# Altium footprint library WR-MPC3.PcbLib: 235 footprints (part 15 of 15)
Each footprint in its own frame and in the unit in brackets; x right, y up, seen from the top. Pads: shape width x height; smd on the part's side, far side on the other; paste and mask are expansions set on the pad; w line width, h text height; cw(c..) or ccw(c..) is an arc to the next point about the centre after c.
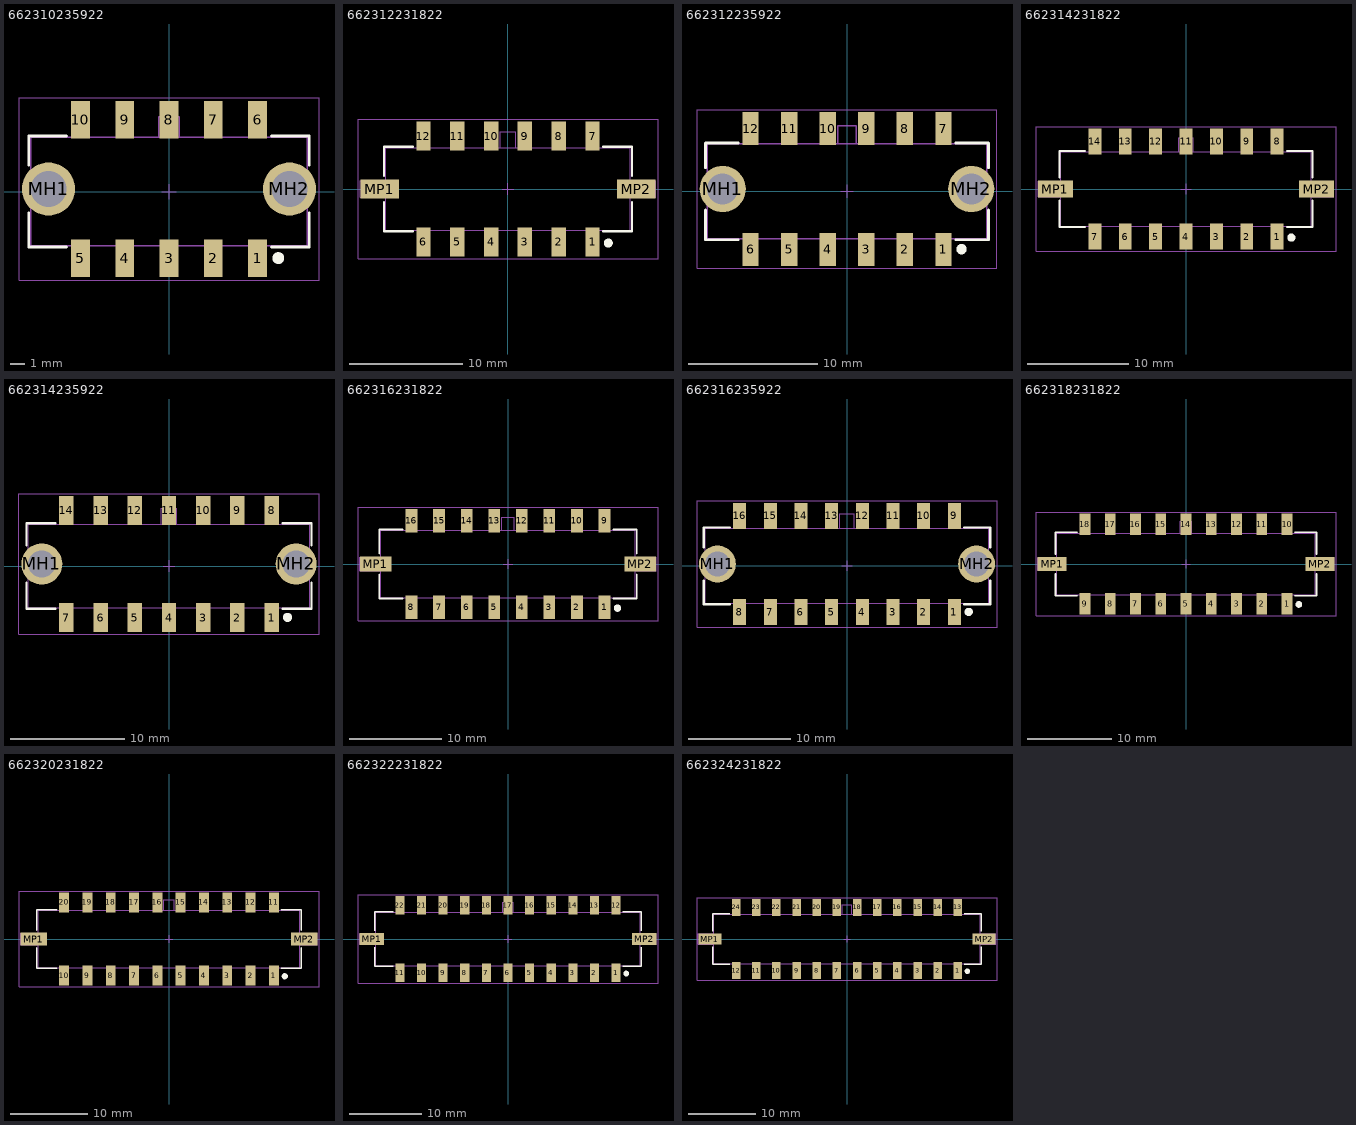
[diagram p14: the footprints below, top view; thin cyan lines are the x and y axes]

## 662310235922 [mm] "3.00mm SMT Male Dual Row Vertical Header with THT Retention Clip, 10p"
height 9.9
pads (12):
  rect 1.27x2.54 smd: 1(6,-4.52) 2(3,-4.52) 3(0,-4.52) 4(-3,-4.52) 5(-6,-4.52) 6(6,4.88) 7(3,4.88) 8(0,4.88) 9(-3,4.88) 10(-6,4.88)
  round 3.6 hole 2.41: MH1(-8.16,0.18) MH2(8.16,0.18)
Top Overlay:
  circle w0.4: c7.4,-4.5 r0.2
  lines w0.2: -9.5,-1.455 -9.5,-3.755 -6.95,-3.755 ; -9.5,1.815 -9.5,3.755 -6.95,3.755 ; 6.95,-3.755 9.5,-3.755 9.5,-1.455 ; 6.95,3.755 9.5,3.755 9.5,1.815
Top Designator:
  text ".Designator" at -7.498,-0.5 h1.5
Top Component Outline:
  lines w0.1: -6.32,-3.68 -6.32,-5.45 -5.68,-5.45 -5.68,-3.68 ; -6.32,3.68 -6.32,5.95 -5.68,5.95 -5.68,3.68 ; -3.32,-3.68 -3.32,-5.45 -2.68,-5.45 -2.68,-3.68 ; -3.32,3.68 -3.32,5.95 -2.68,5.95 -2.68,3.68 ; -0.7,3.68 -0.7,5.08 0.7,5.08 0.7,3.68 ; -0.32,-3.68 -0.32,-5.45 0.32,-5.45 0.32,-3.68 ; -0.32,3.68 -0.32,5.95 0.32,5.95 0.32,3.68 ; 2.68,-3.68 2.68,-5.45 3.32,-5.45 3.32,-3.68 ; 2.68,3.68 2.68,5.95 3.32,5.95 3.32,3.68 ; 5.68,-3.68 5.68,-5.45 6.32,-5.45 6.32,-3.68 ; 5.68,3.68 5.68,5.95 6.32,5.95 6.32,3.68 ; -9.35,-3.68 9.35,-3.68 9.35,3.68 -9.35,3.68 -9.35,-3.68
Top 3D Body:
  lines w0.1: -6.32,-3.68 -6.32,-5.45 -5.68,-5.45 -5.68,-3.68 ; -6.32,3.68 -6.32,5.95 -5.68,5.95 -5.68,3.68 ; -3.32,-3.68 -3.32,-5.45 -2.68,-5.45 -2.68,-3.68 ; -3.32,3.68 -3.32,5.95 -2.68,5.95 -2.68,3.68 ; -0.7,3.68 -0.7,5.08 0.7,5.08 0.7,3.68 ; -0.32,-3.68 -0.32,-5.45 0.32,-5.45 0.32,-3.68 ; -0.32,3.68 -0.32,5.95 0.32,5.95 0.32,3.68 ; 2.68,-3.68 2.68,-5.45 3.32,-5.45 3.32,-3.68 ; 2.68,3.68 2.68,5.95 3.32,5.95 3.32,3.68 ; 5.68,-3.68 5.68,-5.45 6.32,-5.45 6.32,-3.68 ; 5.68,3.68 5.68,5.95 6.32,5.95 6.32,3.68 ; -9.35,-3.68 -9.35,3.68 9.35,3.68 9.35,-3.68 -9.35,-3.68
Top Courtyard:
  lines w0.05: -10.16,-5.99 10.16,-5.99 10.16,6.35 -10.16,6.35 -10.16,-5.99
Top Component Center:
  lines w0.05: -0.5,0 0.5,0 ; 0,-0.5 0,0.5
3D body "662310235922.stp": height 11.42, standoff -3.08, extent -9.35,-5.45 9.35,5.95

## 662312231822 [mm] "3.00mm SMT Male Dual Row Vertical Header with SMT Solder Tab, 12p"
height 9.9
pads (14):
  rect 1.27x2.54 smd: 1(7.5,-4.7) 2(4.5,-4.7) 3(1.5,-4.7) 4(-1.5,-4.7) 5(-4.5,-4.7) 6(-7.5,-4.7) 7(7.5,4.7) 8(4.5,4.7) 9(1.5,4.7) 10(-1.5,4.7) 11(-4.5,4.7) 12(-7.5,4.7)
  rect 3.43x1.65 smd: MP1(-11.395,0) MP2(11.395,0)
Top Overlay:
  circle w0.4: c8.9,-4.795 r0.2
  lines w0.2: -11,-1.155 -11,-3.755 -8.45,-3.755 ; -11,1.155 -11,3.755 -8.45,3.755 ; 8.45,-3.755 11,-3.755 11,-1.155 ; 8.45,3.755 11,3.755 11,1.155
Top Designator:
  text ".Designator" at -7.498,-0.5 h1.5
Top Component Outline:
  lines w0.1: -10.85,-0.75 -13.1,-0.75 -13.1,0.75 -10.85,0.75 ; -7.82,-3.68 -7.82,-5.698 -7.18,-5.698 -7.18,-3.68 ; -7.82,3.68 -7.82,5.698 -7.18,5.698 -7.18,3.68 ; -4.82,-3.68 -4.82,-5.698 -4.18,-5.698 -4.18,-3.68 ; -4.82,3.68 -4.82,5.698 -4.18,5.698 -4.18,3.68 ; -1.82,-3.68 -1.82,-5.698 -1.18,-5.698 -1.18,-3.68 ; -1.82,3.68 -1.82,5.698 -1.18,5.698 -1.18,3.68 ; -0.7,3.68 -0.7,5.08 0.7,5.08 0.7,3.68 ; 1.18,-3.68 1.18,-5.698 1.82,-5.698 1.82,-3.68 ; 1.18,3.68 1.18,5.698 1.82,5.698 1.82,3.68 ; 4.18,-3.68 4.18,-5.698 4.82,-5.698 4.82,-3.68 ; 4.18,3.68 4.18,5.698 4.82,5.698 4.82,3.68 ; 7.18,-3.68 7.18,-5.698 7.82,-5.698 7.82,-3.68 ; 7.18,3.68 7.18,5.698 7.82,5.698 7.82,3.68 ; 10.85,-0.75 13.1,-0.75 13.1,0.75 10.85,0.75 ; -10.85,-3.68 10.85,-3.68 10.85,3.68 -10.85,3.68 -10.85,-3.68
Top 3D Body:
  lines w0.1: -10.85,-0.75 -13.1,-0.75 -13.1,0.75 -10.85,0.75 ; -7.82,-3.68 -7.82,-5.698 -7.18,-5.698 -7.18,-3.68 ; -7.82,3.68 -7.82,5.698 -7.18,5.698 -7.18,3.68 ; -4.82,-3.68 -4.82,-5.698 -4.18,-5.698 -4.18,-3.68 ; -4.82,3.68 -4.82,5.698 -4.18,5.698 -4.18,3.68 ; -1.82,-3.68 -1.82,-5.698 -1.18,-5.698 -1.18,-3.68 ; -1.82,3.68 -1.82,5.698 -1.18,5.698 -1.18,3.68 ; -0.7,3.68 -0.7,5.08 0.7,5.08 0.7,3.68 ; 1.18,-3.68 1.18,-5.698 1.82,-5.698 1.82,-3.68 ; 1.18,3.68 1.18,5.698 1.82,5.698 1.82,3.68 ; 4.18,-3.68 4.18,-5.698 4.82,-5.698 4.82,-3.68 ; 4.18,3.68 4.18,5.698 4.82,5.698 4.82,3.68 ; 7.18,-3.68 7.18,-5.698 7.82,-5.698 7.82,-3.68 ; 7.18,3.68 7.18,5.698 7.82,5.698 7.82,3.68 ; 10.85,-0.75 13.1,-0.75 13.1,0.75 10.85,0.75 ; -10.85,-3.68 10.85,-3.68 10.85,3.68 -10.85,3.68 -10.85,-3.68
Top Courtyard:
  lines w0.05: -13.31,-6.17 13.31,-6.17 13.31,6.17 -13.31,6.17 -13.31,-6.17
Top Component Center:
  lines w0.05: -0.5,0 0.5,0 ; 0,-0.5 0,0.5
3D body "662312231822.stp": height 11.43, standoff 0.03, extent -13.1,-5.698 13.1,5.698

## 662312235922 [mm] "3.00mm SMT Male Dual Row Vertical Header with THT Retention Clip, 12p"
height 9.9
pads (14):
  rect 1.27x2.54 smd: 1(7.5,-4.52) 2(4.5,-4.52) 3(1.5,-4.52) 4(-1.5,-4.52) 5(-4.5,-4.52) 6(-7.5,-4.52) 7(7.5,4.88) 8(4.5,4.88) 9(1.5,4.88) 10(-1.5,4.88) 11(-4.5,4.88) 12(-7.5,4.88)
  round 3.6 hole 2.41: MH1(-9.66,0.18) MH2(9.66,0.18)
Top Overlay:
  circle w0.4: c8.9,-4.5 r0.2
  lines w0.2: -11,-1.455 -11,-3.755 -8.45,-3.755 ; -11,1.815 -11,3.755 -8.45,3.755 ; 8.45,-3.755 11,-3.755 11,-1.455 ; 8.45,3.755 11,3.755 11,1.815
Top Designator:
  text ".Designator" at -7.498,-0.5 h1.5
Top Component Outline:
  lines w0.1: -7.82,-3.68 -7.82,-5.45 -7.18,-5.45 -7.18,-3.68 ; -7.82,3.68 -7.82,5.95 -7.18,5.95 -7.18,3.68 ; -4.82,-3.68 -4.82,-5.45 -4.18,-5.45 -4.18,-3.68 ; -4.82,3.68 -4.82,5.95 -4.18,5.95 -4.18,3.68 ; -1.82,-3.68 -1.82,-5.45 -1.18,-5.45 -1.18,-3.68 ; -1.82,3.68 -1.82,5.95 -1.18,5.95 -1.18,3.68 ; -0.7,3.68 -0.7,5.08 0.7,5.08 0.7,3.68 ; 1.18,-3.68 1.18,-5.45 1.82,-5.45 1.82,-3.68 ; 1.18,3.68 1.18,5.95 1.82,5.95 1.82,3.68 ; 4.18,-3.68 4.18,-5.45 4.82,-5.45 4.82,-3.68 ; 4.18,3.68 4.18,5.95 4.82,5.95 4.82,3.68 ; 7.18,-3.68 7.18,-5.45 7.82,-5.45 7.82,-3.68 ; 7.18,3.68 7.18,5.95 7.82,5.95 7.82,3.68 ; -10.85,-3.68 10.85,-3.68 10.85,3.68 -10.85,3.68 -10.85,-3.68
Top 3D Body:
  lines w0.1: -7.82,-3.68 -7.82,-5.45 -7.18,-5.45 -7.18,-3.68 ; -7.82,3.68 -7.82,5.95 -7.18,5.95 -7.18,3.68 ; -4.82,-3.68 -4.82,-5.45 -4.18,-5.45 -4.18,-3.68 ; -4.82,3.68 -4.82,5.95 -4.18,5.95 -4.18,3.68 ; -1.82,-3.68 -1.82,-5.45 -1.18,-5.45 -1.18,-3.68 ; -1.82,3.68 -1.82,5.95 -1.18,5.95 -1.18,3.68 ; -0.7,3.68 -0.7,5.08 0.7,5.08 0.7,3.68 ; 1.18,-3.68 1.18,-5.45 1.82,-5.45 1.82,-3.68 ; 1.18,3.68 1.18,5.95 1.82,5.95 1.82,3.68 ; 4.18,-3.68 4.18,-5.45 4.82,-5.45 4.82,-3.68 ; 4.18,3.68 4.18,5.95 4.82,5.95 4.82,3.68 ; 7.18,-3.68 7.18,-5.45 7.82,-5.45 7.82,-3.68 ; 7.18,3.68 7.18,5.95 7.82,5.95 7.82,3.68 ; -10.85,-3.68 10.85,-3.68 10.85,3.68 -10.85,3.68 -10.85,-3.68
Top Courtyard:
  lines w0.05: -11.66,-5.99 -11.66,6.35 11.66,6.35 11.66,-5.99 -11.66,-5.99
Top Component Center:
  lines w0.05: -0.5,0 0.5,0 ; 0,-0.5 0,0.5
3D body "662312235922.stp": height 11.42, standoff -3.08, extent -10.85,-5.45 10.85,5.95

## 662314231822 [mm] "3.00mm SMT Male Dual Row Vertical Header with SMT Solder Tab, 14p"
height 9.9
pads (16):
  rect 1.27x2.54 smd: 1(9,-4.7) 2(6,-4.7) 3(3,-4.7) 4(0,-4.7) 5(-3,-4.7) 6(-6,-4.7) 7(-9,-4.7) 8(9,4.7) 9(6,4.7) 10(3,4.7) 11(0,4.7) 12(-3,4.7) 13(-6,4.7) 14(-9,4.7)
  rect 3.43x1.65 smd: MP1(-12.895,0) MP2(12.895,0)
Top Overlay:
  circle w0.4: c10.4,-4.795 r0.2
  lines w0.2: -12.5,-1.155 -12.5,-3.755 -9.95,-3.755 ; -12.5,1.155 -12.5,3.755 -9.95,3.755 ; 9.95,-3.755 12.5,-3.755 12.5,-1.155 ; 9.95,3.755 12.5,3.755 12.5,1.155
Top Designator:
  text ".Designator" at -7.498,-0.5 h1.5
Top Component Outline:
  lines w0.1: -12.35,-0.75 -14.6,-0.75 -14.6,0.75 -12.35,0.75 ; -9.32,-3.68 -9.32,-5.698 -8.68,-5.698 -8.68,-3.68 ; -9.32,3.68 -9.32,5.698 -8.68,5.698 -8.68,3.68 ; -6.32,-3.68 -6.32,-5.698 -5.68,-5.698 -5.68,-3.68 ; -6.32,3.68 -6.32,5.698 -5.68,5.698 -5.68,3.68 ; -3.32,-3.68 -3.32,-5.698 -2.68,-5.698 -2.68,-3.68 ; -3.32,3.68 -3.32,5.698 -2.68,5.698 -2.68,3.68 ; -0.7,3.68 -0.7,5.08 0.7,5.08 0.7,3.68 ; -0.32,-3.68 -0.32,-5.698 0.32,-5.698 0.32,-3.68 ; -0.32,3.68 -0.32,5.698 0.32,5.698 0.32,3.68 ; 2.68,-3.68 2.68,-5.698 3.32,-5.698 3.32,-3.68 ; 2.68,3.68 2.68,5.698 3.32,5.698 3.32,3.68 ; 5.68,-3.68 5.68,-5.698 6.32,-5.698 6.32,-3.68 ; 5.68,3.68 5.68,5.698 6.32,5.698 6.32,3.68 ; 8.68,-3.68 8.68,-5.698 9.32,-5.698 9.32,-3.68 ; 8.68,3.68 8.68,5.698 9.32,5.698 9.32,3.68 ; 12.35,-0.75 14.6,-0.75 14.6,0.75 12.35,0.75 ; -12.35,-3.68 12.35,-3.68 12.35,3.68 -12.35,3.68 -12.35,-3.68
Top 3D Body:
  lines w0.1: -12.35,-0.75 -14.6,-0.75 -14.6,0.75 -12.35,0.75 ; -9.32,-3.68 -9.32,-5.698 -8.68,-5.698 -8.68,-3.68 ; -9.32,3.68 -9.32,5.698 -8.68,5.698 -8.68,3.68 ; -6.32,-3.68 -6.32,-5.698 -5.68,-5.698 -5.68,-3.68 ; -6.32,3.68 -6.32,5.698 -5.68,5.698 -5.68,3.68 ; -3.32,-3.68 -3.32,-5.698 -2.68,-5.698 -2.68,-3.68 ; -3.32,3.68 -3.32,5.698 -2.68,5.698 -2.68,3.68 ; -0.7,3.68 -0.7,5.08 0.7,5.08 0.7,3.68 ; -0.32,-3.68 -0.32,-5.698 0.32,-5.698 0.32,-3.68 ; -0.32,3.68 -0.32,5.698 0.32,5.698 0.32,3.68 ; 2.68,-3.68 2.68,-5.698 3.32,-5.698 3.32,-3.68 ; 2.68,3.68 2.68,5.698 3.32,5.698 3.32,3.68 ; 5.68,-3.68 5.68,-5.698 6.32,-5.698 6.32,-3.68 ; 5.68,3.68 5.68,5.698 6.32,5.698 6.32,3.68 ; 8.68,-3.68 8.68,-5.698 9.32,-5.698 9.32,-3.68 ; 8.68,3.68 8.68,5.698 9.32,5.698 9.32,3.68 ; 12.35,-0.75 14.6,-0.75 14.6,0.75 12.35,0.75 ; -12.35,-3.68 12.35,-3.68 12.35,3.68 -12.35,3.68 -12.35,-3.68
Top Courtyard:
  lines w0.05: -14.81,-6.17 14.81,-6.17 14.81,6.17 -14.81,6.17 -14.81,-6.17
Top Component Center:
  lines w0.05: -0.5,0 0.5,0 ; 0,-0.5 0,0.5
3D body "662314231822.stp": height 11.43, standoff 0.03, extent -14.6,-5.698 14.6,5.698

## 662314235922 [mm] "3.00mm SMT Male Dual Row Vertical Header with THT Retention Clip, 14p"
height 9.9
pads (16):
  rect 1.27x2.54 smd: 1(9,-4.52) 2(6,-4.52) 3(3,-4.52) 4(0,-4.52) 5(-3,-4.52) 6(-6,-4.52) 7(-9,-4.52) 8(9,4.88) 9(6,4.88) 10(3,4.88) 11(0,4.88) 12(-3,4.88) 13(-6,4.88) 14(-9,4.88)
  round 3.6 hole 2.41: MH1(-11.16,0.18) MH2(11.16,0.18)
Top Overlay:
  circle w0.4: c10.4,-4.5 r0.2
  lines w0.2: -12.5,-1.455 -12.5,-3.755 -9.95,-3.755 ; -12.5,1.815 -12.5,3.755 -9.95,3.755 ; 9.95,-3.755 12.5,-3.755 12.5,-1.455 ; 9.95,3.755 12.5,3.755 12.5,1.815
Top Designator:
  text ".Designator" at -7.498,-0.5 h1.5
Top Component Outline:
  lines w0.1: -9.32,-3.68 -9.32,-5.45 -8.68,-5.45 -8.68,-3.68 ; -9.32,3.68 -9.32,5.95 -8.68,5.95 -8.68,3.68 ; -6.32,-3.68 -6.32,-5.45 -5.68,-5.45 -5.68,-3.68 ; -6.32,3.68 -6.32,5.95 -5.68,5.95 -5.68,3.68 ; -3.32,-3.68 -3.32,-5.45 -2.68,-5.45 -2.68,-3.68 ; -3.32,3.68 -3.32,5.95 -2.68,5.95 -2.68,3.68 ; -0.7,3.68 -0.7,5.08 0.7,5.08 0.7,3.68 ; -0.32,-3.68 -0.32,-5.45 0.32,-5.45 0.32,-3.68 ; -0.32,3.68 -0.32,5.95 0.32,5.95 0.32,3.68 ; 2.68,-3.68 2.68,-5.45 3.32,-5.45 3.32,-3.68 ; 2.68,3.68 2.68,5.95 3.32,5.95 3.32,3.68 ; 5.68,-3.68 5.68,-5.45 6.32,-5.45 6.32,-3.68 ; 5.68,3.68 5.68,5.95 6.32,5.95 6.32,3.68 ; 8.68,-3.68 8.68,-5.45 9.32,-5.45 9.32,-3.68 ; 8.68,3.68 8.68,5.95 9.32,5.95 9.32,3.68 ; -12.35,-3.68 12.35,-3.68 12.35,3.68 -12.35,3.68 -12.35,-3.68
Top 3D Body:
  lines w0.1: -9.32,-3.68 -9.32,-5.45 -8.68,-5.45 -8.68,-3.68 ; -9.32,3.68 -9.32,5.95 -8.68,5.95 -8.68,3.68 ; -6.32,-3.68 -6.32,-5.45 -5.68,-5.45 -5.68,-3.68 ; -6.32,3.68 -6.32,5.95 -5.68,5.95 -5.68,3.68 ; -3.32,-3.68 -3.32,-5.45 -2.68,-5.45 -2.68,-3.68 ; -3.32,3.68 -3.32,5.95 -2.68,5.95 -2.68,3.68 ; -0.7,3.68 -0.7,5.08 0.7,5.08 0.7,3.68 ; -0.32,-3.68 -0.32,-5.45 0.32,-5.45 0.32,-3.68 ; -0.32,3.68 -0.32,5.95 0.32,5.95 0.32,3.68 ; 2.68,-3.68 2.68,-5.45 3.32,-5.45 3.32,-3.68 ; 2.68,3.68 2.68,5.95 3.32,5.95 3.32,3.68 ; 5.68,-3.68 5.68,-5.45 6.32,-5.45 6.32,-3.68 ; 5.68,3.68 5.68,5.95 6.32,5.95 6.32,3.68 ; 8.68,-3.68 8.68,-5.45 9.32,-5.45 9.32,-3.68 ; 8.68,3.68 8.68,5.95 9.32,5.95 9.32,3.68 ; -12.35,-3.68 12.35,-3.68 12.35,3.68 -12.35,3.68 -12.35,-3.68
Top Courtyard:
  lines w0.05: -13.16,-5.99 -13.16,6.35 13.16,6.35 13.16,-5.99 -13.16,-5.99
Top Component Center:
  lines w0.05: -0.5,0 0.5,0 ; 0,-0.5 0,0.5
3D body "662314235922.stp": height 11.42, standoff -3.08, extent -12.35,-5.45 12.35,5.95

## 662316231822 [mm] "3.00mm SMT Male Dual Row Vertical Header with SMT Solder Tab, 16p"
height 9.9
pads (18):
  rect 1.27x2.54 smd: 1(10.5,-4.7) 2(7.5,-4.7) 3(4.5,-4.7) 4(1.5,-4.7) 5(-1.5,-4.7) 6(-4.5,-4.7) 7(-7.5,-4.7) 8(-10.5,-4.7) 9(10.5,4.7) 10(7.5,4.7) 11(4.5,4.7) 12(1.5,4.7) 13(-1.5,4.7) 14(-4.5,4.7) 15(-7.5,4.7) 16(-10.5,4.7)
  rect 3.43x1.65 smd: MP1(-14.395,0) MP2(14.395,0)
Top Overlay:
  circle w0.4: c11.9,-4.795 r0.2
  lines w0.2: -14,-1.155 -14,-3.755 -11.45,-3.755 ; -14,1.155 -14,3.755 -11.45,3.755 ; 11.45,-3.755 14,-3.755 14,-1.155 ; 11.45,3.755 14,3.755 14,1.155
Top Designator:
  text ".Designator" at -7.498,-0.5 h1.5
Top Component Outline:
  lines w0.1: -13.85,-0.75 -16.1,-0.75 -16.1,0.75 -13.85,0.75 ; -10.82,-3.68 -10.82,-5.698 -10.18,-5.698 -10.18,-3.68 ; -10.82,3.68 -10.82,5.698 -10.18,5.698 -10.18,3.68 ; -7.82,-3.68 -7.82,-5.698 -7.18,-5.698 -7.18,-3.68 ; -7.82,3.68 -7.82,5.698 -7.18,5.698 -7.18,3.68 ; -4.82,-3.68 -4.82,-5.698 -4.18,-5.698 -4.18,-3.68 ; -4.82,3.68 -4.82,5.698 -4.18,5.698 -4.18,3.68 ; -1.82,-3.68 -1.82,-5.698 -1.18,-5.698 -1.18,-3.68 ; -1.82,3.68 -1.82,5.698 -1.18,5.698 -1.18,3.68 ; -0.7,3.68 -0.7,5.08 0.7,5.08 0.7,3.68 ; 1.18,-3.68 1.18,-5.698 1.82,-5.698 1.82,-3.68 ; 1.18,3.68 1.18,5.698 1.82,5.698 1.82,3.68 ; 4.18,-3.68 4.18,-5.698 4.82,-5.698 4.82,-3.68 ; 4.18,3.68 4.18,5.698 4.82,5.698 4.82,3.68 ; 7.18,-3.68 7.18,-5.698 7.82,-5.698 7.82,-3.68 ; 7.18,3.68 7.18,5.698 7.82,5.698 7.82,3.68 ; 10.18,-3.68 10.18,-5.698 10.82,-5.698 10.82,-3.68 ; 10.18,3.68 10.18,5.698 10.82,5.698 10.82,3.68 ; 13.85,-0.75 16.1,-0.75 16.1,0.75 13.85,0.75 ; -13.85,-3.68 13.85,-3.68 13.85,3.68 -13.85,3.68 -13.85,-3.68
Top 3D Body:
  lines w0.1: -13.85,-0.75 -16.1,-0.75 -16.1,0.75 -13.85,0.75 ; -10.82,-3.68 -10.82,-5.698 -10.18,-5.698 -10.18,-3.68 ; -10.82,3.68 -10.82,5.698 -10.18,5.698 -10.18,3.68 ; -7.82,-3.68 -7.82,-5.698 -7.18,-5.698 -7.18,-3.68 ; -7.82,3.68 -7.82,5.698 -7.18,5.698 -7.18,3.68 ; -4.82,-3.68 -4.82,-5.698 -4.18,-5.698 -4.18,-3.68 ; -4.82,3.68 -4.82,5.698 -4.18,5.698 -4.18,3.68 ; -1.82,-3.68 -1.82,-5.698 -1.18,-5.698 -1.18,-3.68 ; -1.82,3.68 -1.82,5.698 -1.18,5.698 -1.18,3.68 ; -0.7,3.68 -0.7,5.08 0.7,5.08 0.7,3.68 ; 1.18,-3.68 1.18,-5.698 1.82,-5.698 1.82,-3.68 ; 1.18,3.68 1.18,5.698 1.82,5.698 1.82,3.68 ; 4.18,-3.68 4.18,-5.698 4.82,-5.698 4.82,-3.68 ; 4.18,3.68 4.18,5.698 4.82,5.698 4.82,3.68 ; 7.18,-3.68 7.18,-5.698 7.82,-5.698 7.82,-3.68 ; 7.18,3.68 7.18,5.698 7.82,5.698 7.82,3.68 ; 10.18,-3.68 10.18,-5.698 10.82,-5.698 10.82,-3.68 ; 10.18,3.68 10.18,5.698 10.82,5.698 10.82,3.68 ; 13.85,-0.75 16.1,-0.75 16.1,0.75 13.85,0.75 ; -13.85,-3.68 13.85,-3.68 13.85,3.68 -13.85,3.68 -13.85,-3.68
Top Courtyard:
  lines w0.05: -16.31,-6.17 16.31,-6.17 16.31,6.17 -16.31,6.17 -16.31,-6.17
Top Component Center:
  lines w0.05: -0.5,0 0.5,0 ; 0,-0.5 0,0.5
3D body "662316231822.stp": height 11.43, standoff 0.03, extent -16.1,-5.698 16.1,5.698

## 662316235922 [mm] "3.00mm SMT Male Dual Row Vertical Header with THT Retention Clip, 16p"
height 9.9
pads (18):
  rect 1.27x2.54 smd: 1(10.5,-4.52) 2(7.5,-4.52) 3(4.5,-4.52) 4(1.5,-4.52) 5(-1.5,-4.52) 6(-4.5,-4.52) 7(-7.5,-4.52) 8(-10.5,-4.52) 9(10.5,4.88) 10(7.5,4.88) 11(4.5,4.88) 12(1.5,4.88) 13(-1.5,4.88) 14(-4.5,4.88) 15(-7.5,4.88) 16(-10.5,4.88)
  round 3.6 hole 2.41: MH1(-12.66,0.18) MH2(12.66,0.18)
Top Overlay:
  circle w0.4: c11.9,-4.5 r0.2
  lines w0.2: -14,-1.455 -14,-3.755 -11.45,-3.755 ; -14,1.815 -14,3.755 -11.45,3.755 ; 11.45,-3.755 14,-3.755 14,-1.455 ; 11.45,3.755 14,3.755 14,1.815
Top Designator:
  text ".Designator" at -7.498,-0.5 h1.5
Top Component Outline:
  lines w0.1: -10.82,-3.68 -10.82,-5.45 -10.18,-5.45 -10.18,-3.68 ; -10.82,3.68 -10.82,5.95 -10.18,5.95 -10.18,3.68 ; -7.82,-3.68 -7.82,-5.45 -7.18,-5.45 -7.18,-3.68 ; -7.82,3.68 -7.82,5.95 -7.18,5.95 -7.18,3.68 ; -4.82,-3.68 -4.82,-5.45 -4.18,-5.45 -4.18,-3.68 ; -4.82,3.68 -4.82,5.95 -4.18,5.95 -4.18,3.68 ; -1.82,-3.68 -1.82,-5.45 -1.18,-5.45 -1.18,-3.68 ; -1.82,3.68 -1.82,5.95 -1.18,5.95 -1.18,3.68 ; -0.7,3.68 -0.7,5.08 0.7,5.08 0.7,3.68 ; 1.18,-3.68 1.18,-5.45 1.82,-5.45 1.82,-3.68 ; 1.18,3.68 1.18,5.95 1.82,5.95 1.82,3.68 ; 4.18,-3.68 4.18,-5.45 4.82,-5.45 4.82,-3.68 ; 4.18,3.68 4.18,5.95 4.82,5.95 4.82,3.68 ; 7.18,-3.68 7.18,-5.45 7.82,-5.45 7.82,-3.68 ; 7.18,3.68 7.18,5.95 7.82,5.95 7.82,3.68 ; 10.18,-3.68 10.18,-5.45 10.82,-5.45 10.82,-3.68 ; 10.18,3.68 10.18,5.95 10.82,5.95 10.82,3.68 ; -13.85,-3.68 -13.85,3.68 13.85,3.68 13.85,-3.68 -13.85,-3.68
Top 3D Body:
  lines w0.1: -10.82,-3.68 -10.82,-5.45 -10.18,-5.45 -10.18,-3.68 ; -10.82,3.68 -10.82,5.95 -10.18,5.95 -10.18,3.68 ; -7.82,-3.68 -7.82,-5.45 -7.18,-5.45 -7.18,-3.68 ; -7.82,3.68 -7.82,5.95 -7.18,5.95 -7.18,3.68 ; -4.82,-3.68 -4.82,-5.45 -4.18,-5.45 -4.18,-3.68 ; -4.82,3.68 -4.82,5.95 -4.18,5.95 -4.18,3.68 ; -1.82,-3.68 -1.82,-5.45 -1.18,-5.45 -1.18,-3.68 ; -1.82,3.68 -1.82,5.95 -1.18,5.95 -1.18,3.68 ; -0.7,3.68 -0.7,5.08 0.7,5.08 0.7,3.68 ; 1.18,-3.68 1.18,-5.45 1.82,-5.45 1.82,-3.68 ; 1.18,3.68 1.18,5.95 1.82,5.95 1.82,3.68 ; 4.18,-3.68 4.18,-5.45 4.82,-5.45 4.82,-3.68 ; 4.18,3.68 4.18,5.95 4.82,5.95 4.82,3.68 ; 7.18,-3.68 7.18,-5.45 7.82,-5.45 7.82,-3.68 ; 7.18,3.68 7.18,5.95 7.82,5.95 7.82,3.68 ; 10.18,-3.68 10.18,-5.45 10.82,-5.45 10.82,-3.68 ; 10.18,3.68 10.18,5.95 10.82,5.95 10.82,3.68 ; -13.85,-3.68 -13.85,3.68 13.85,3.68 13.85,-3.68 -13.85,-3.68
Top Courtyard:
  lines w0.05: -14.66,-5.99 14.66,-5.99 14.66,6.35 -14.66,6.35 -14.66,-5.99
Top Component Center:
  lines w0.05: -0.5,0 0.5,0 ; 0,-0.5 0,0.5
3D body "662316235922.stp": height 11.42, standoff -3.08, extent -13.85,-5.45 13.85,5.95

## 662318231822 [mm] "3.00mm SMT Male Dual Row Vertical Header with SMT Solder Tab, 18p"
height 9.9
pads (20):
  rect 1.27x2.54 smd: 1(12,-4.7) 2(9,-4.7) 3(6,-4.7) 4(3,-4.7) 5(0,-4.7) 6(-3,-4.7) 7(-6,-4.7) 8(-9,-4.7) 9(-12,-4.7) 10(12,4.7) 11(9,4.7) 12(6,4.7) 13(3,4.7) 14(0,4.7) 15(-3,4.7) 16(-6,4.7) 17(-9,4.7) 18(-12,4.7)
  rect 3.43x1.65 smd: MP1(-15.895,0) MP2(15.895,0)
Top Overlay:
  circle w0.4: c13.4,-4.795 r0.2
  lines w0.2: -15.5,-1.155 -15.5,-3.755 -12.95,-3.755 ; -15.5,1.155 -15.5,3.755 -12.95,3.755 ; 12.95,-3.755 15.5,-3.755 15.5,-1.155 ; 12.95,3.755 15.5,3.755 15.5,1.155
Top Designator:
  text ".Designator" at -7.498,-0.5 h1.5
Top Component Outline:
  lines w0.1: -15.35,-0.75 -17.6,-0.75 -17.6,0.75 -15.35,0.75 ; -12.32,-3.68 -12.32,-5.698 -11.68,-5.698 -11.68,-3.68 ; -12.32,3.68 -12.32,5.698 -11.68,5.698 -11.68,3.68 ; -9.32,-3.68 -9.32,-5.698 -8.68,-5.698 -8.68,-3.68 ; -9.32,3.68 -9.32,5.698 -8.68,5.698 -8.68,3.68 ; -6.32,-3.68 -6.32,-5.698 -5.68,-5.698 -5.68,-3.68 ; -6.32,3.68 -6.32,5.698 -5.68,5.698 -5.68,3.68 ; -3.32,-3.68 -3.32,-5.698 -2.68,-5.698 -2.68,-3.68 ; -3.32,3.68 -3.32,5.698 -2.68,5.698 -2.68,3.68 ; -0.7,3.68 -0.7,5.08 0.7,5.08 0.7,3.68 ; -0.32,-3.68 -0.32,-5.698 0.32,-5.698 0.32,-3.68 ; -0.32,3.68 -0.32,5.698 0.32,5.698 0.32,3.68 ; 2.68,-3.68 2.68,-5.698 3.32,-5.698 3.32,-3.68 ; 2.68,3.68 2.68,5.698 3.32,5.698 3.32,3.68 ; 5.68,-3.68 5.68,-5.698 6.32,-5.698 6.32,-3.68 ; 5.68,3.68 5.68,5.698 6.32,5.698 6.32,3.68 ; 8.68,-3.68 8.68,-5.698 9.32,-5.698 9.32,-3.68 ; 8.68,3.68 8.68,5.698 9.32,5.698 9.32,3.68 ; 11.68,-3.68 11.68,-5.698 12.32,-5.698 12.32,-3.68 ; 11.68,3.68 11.68,5.698 12.32,5.698 12.32,3.68 ; 15.35,-0.75 17.6,-0.75 17.6,0.75 15.35,0.75 ; -15.35,-3.68 -15.35,3.68 15.35,3.68 15.35,-3.68 -15.35,-3.68
Top 3D Body:
  lines w0.1: -15.35,-0.75 -17.6,-0.75 -17.6,0.75 -15.35,0.75 ; -12.32,-3.68 -12.32,-5.698 -11.68,-5.698 -11.68,-3.68 ; -12.32,3.68 -12.32,5.698 -11.68,5.698 -11.68,3.68 ; -9.32,-3.68 -9.32,-5.698 -8.68,-5.698 -8.68,-3.68 ; -9.32,3.68 -9.32,5.698 -8.68,5.698 -8.68,3.68 ; -6.32,-3.68 -6.32,-5.698 -5.68,-5.698 -5.68,-3.68 ; -6.32,3.68 -6.32,5.698 -5.68,5.698 -5.68,3.68 ; -3.32,-3.68 -3.32,-5.698 -2.68,-5.698 -2.68,-3.68 ; -3.32,3.68 -3.32,5.698 -2.68,5.698 -2.68,3.68 ; -0.7,3.68 -0.7,5.08 0.7,5.08 0.7,3.68 ; -0.32,-3.68 -0.32,-5.698 0.32,-5.698 0.32,-3.68 ; -0.32,3.68 -0.32,5.698 0.32,5.698 0.32,3.68 ; 2.68,-3.68 2.68,-5.698 3.32,-5.698 3.32,-3.68 ; 2.68,3.68 2.68,5.698 3.32,5.698 3.32,3.68 ; 5.68,-3.68 5.68,-5.698 6.32,-5.698 6.32,-3.68 ; 5.68,3.68 5.68,5.698 6.32,5.698 6.32,3.68 ; 8.68,-3.68 8.68,-5.698 9.32,-5.698 9.32,-3.68 ; 8.68,3.68 8.68,5.698 9.32,5.698 9.32,3.68 ; 11.68,-3.68 11.68,-5.698 12.32,-5.698 12.32,-3.68 ; 11.68,3.68 11.68,5.698 12.32,5.698 12.32,3.68 ; 15.35,-0.75 17.6,-0.75 17.6,0.75 15.35,0.75 ; -15.35,-3.68 15.35,-3.68 15.35,3.68 -15.35,3.68 -15.35,-3.68
Top Courtyard:
  lines w0.05: -17.81,-6.17 17.81,-6.17 17.81,6.17 -17.81,6.17 -17.81,-6.17
Top Component Center:
  lines w0.05: -0.5,0 0.5,0 ; 0,-0.5 0,0.5
3D body "662318231822.stp": height 11.43, standoff 0.03, extent -17.6,-5.698 17.6,5.698

## 662320231822 [mm] "3.00mm SMT Male Dual Row Vertical Header with SMT Solder Tab, 20p"
height 9.9
pads (22):
  rect 1.27x2.54 smd: 1(13.5,-4.7) 2(10.5,-4.7) 3(7.5,-4.7) 4(4.5,-4.7) 5(1.5,-4.7) 6(-1.5,-4.7) 7(-4.5,-4.7) 8(-7.5,-4.7) 9(-10.5,-4.7) 10(-13.5,-4.7) 11(13.5,4.7) 12(10.5,4.7) 13(7.5,4.7) 14(4.5,4.7) 15(1.5,4.7) 16(-1.5,4.7) 17(-4.5,4.7) 18(-7.5,4.7) 19(-10.5,4.7) 20(-13.5,4.7)
  rect 3.43x1.65 smd: MP1(-17.395,0) MP2(17.395,0)
Top Overlay:
  circle w0.4: c14.9,-4.795 r0.2
  lines w0.2: -17,-1.155 -17,-3.755 -14.45,-3.755 ; -17,1.155 -17,3.755 -14.45,3.755 ; 14.45,-3.755 17,-3.755 17,-1.155 ; 14.45,3.755 17,3.755 17,1.155
Top Designator:
  text ".Designator" at -7.498,-0.5 h1.5
Top Component Outline:
  lines w0.1: -16.85,-0.75 -19.1,-0.75 -19.1,0.75 -16.85,0.75 ; -13.82,-3.68 -13.82,-5.698 -13.18,-5.698 -13.18,-3.68 ; -13.82,3.68 -13.82,5.698 -13.18,5.698 -13.18,3.68 ; -10.82,-3.68 -10.82,-5.698 -10.18,-5.698 -10.18,-3.68 ; -10.82,3.68 -10.82,5.698 -10.18,5.698 -10.18,3.68 ; -7.82,-3.68 -7.82,-5.698 -7.18,-5.698 -7.18,-3.68 ; -7.82,3.68 -7.82,5.698 -7.18,5.698 -7.18,3.68 ; -4.82,-3.68 -4.82,-5.698 -4.18,-5.698 -4.18,-3.68 ; -4.82,3.68 -4.82,5.698 -4.18,5.698 -4.18,3.68 ; -1.82,-3.68 -1.82,-5.698 -1.18,-5.698 -1.18,-3.68 ; -1.82,3.68 -1.82,5.698 -1.18,5.698 -1.18,3.68 ; -0.7,3.68 -0.7,5.08 0.7,5.08 0.7,3.68 ; 1.18,-3.68 1.18,-5.698 1.82,-5.698 1.82,-3.68 ; 1.18,3.68 1.18,5.698 1.82,5.698 1.82,3.68 ; 4.18,-3.68 4.18,-5.698 4.82,-5.698 4.82,-3.68 ; 4.18,3.68 4.18,5.698 4.82,5.698 4.82,3.68 ; 7.18,-3.68 7.18,-5.698 7.82,-5.698 7.82,-3.68 ; 7.18,3.68 7.18,5.698 7.82,5.698 7.82,3.68 ; 10.18,-3.68 10.18,-5.698 10.82,-5.698 10.82,-3.68 ; 10.18,3.68 10.18,5.698 10.82,5.698 10.82,3.68 ; 13.18,-3.68 13.18,-5.698 13.82,-5.698 13.82,-3.68 ; 13.18,3.68 13.18,5.698 13.82,5.698 13.82,3.68 ; 16.85,-0.75 19.1,-0.75 19.1,0.75 16.85,0.75 ; -16.85,-3.68 16.85,-3.68 16.85,3.68 -16.85,3.68 -16.85,-3.68
Top 3D Body:
  lines w0.1: -16.85,-0.75 -19.1,-0.75 -19.1,0.75 -16.85,0.75 ; -13.82,-3.68 -13.82,-5.698 -13.18,-5.698 -13.18,-3.68 ; -13.82,3.68 -13.82,5.698 -13.18,5.698 -13.18,3.68 ; -10.82,-3.68 -10.82,-5.698 -10.18,-5.698 -10.18,-3.68 ; -10.82,3.68 -10.82,5.698 -10.18,5.698 -10.18,3.68 ; -7.82,-3.68 -7.82,-5.698 -7.18,-5.698 -7.18,-3.68 ; -7.82,3.68 -7.82,5.698 -7.18,5.698 -7.18,3.68 ; -4.82,-3.68 -4.82,-5.698 -4.18,-5.698 -4.18,-3.68 ; -4.82,3.68 -4.82,5.698 -4.18,5.698 -4.18,3.68 ; -1.82,-3.68 -1.82,-5.698 -1.18,-5.698 -1.18,-3.68 ; -1.82,3.68 -1.82,5.698 -1.18,5.698 -1.18,3.68 ; -0.7,3.68 -0.7,5.08 0.7,5.08 0.7,3.68 ; 1.18,-3.68 1.18,-5.698 1.82,-5.698 1.82,-3.68 ; 1.18,3.68 1.18,5.698 1.82,5.698 1.82,3.68 ; 4.18,-3.68 4.18,-5.698 4.82,-5.698 4.82,-3.68 ; 4.18,3.68 4.18,5.698 4.82,5.698 4.82,3.68 ; 7.18,-3.68 7.18,-5.698 7.82,-5.698 7.82,-3.68 ; 7.18,3.68 7.18,5.698 7.82,5.698 7.82,3.68 ; 10.18,-3.68 10.18,-5.698 10.82,-5.698 10.82,-3.68 ; 10.18,3.68 10.18,5.698 10.82,5.698 10.82,3.68 ; 13.18,-3.68 13.18,-5.698 13.82,-5.698 13.82,-3.68 ; 13.18,3.68 13.18,5.698 13.82,5.698 13.82,3.68 ; 16.85,-0.75 19.1,-0.75 19.1,0.75 16.85,0.75 ; -16.85,-3.68 -16.85,3.68 16.85,3.68 16.85,-3.68 -16.85,-3.68
Top Courtyard:
  lines w0.05: -19.31,-6.17 -19.31,6.17 19.31,6.17 19.31,-6.17 -19.31,-6.17
Top Component Center:
  lines w0.05: -0.5,0 0.5,0 ; 0,-0.5 0,0.5
3D body "662320231822.stp": height 11.43, standoff 0.03, extent -19.1,-5.698 19.1,5.698

## 662322231822 [mm] "3.00mm SMT Male Dual Row Vertical Header with SMT Solder Tab, 22p"
height 9.9
pads (24):
  rect 1.27x2.54 smd: 1(15,-4.7) 2(12,-4.7) 3(9,-4.7) 4(6,-4.7) 5(3,-4.7) 6(0,-4.7) 7(-3,-4.7) 8(-6,-4.7) 9(-9,-4.7) 10(-12,-4.7) 11(-15,-4.7) 12(15,4.7) 13(12,4.7) 14(9,4.7) 15(6,4.7) 16(3,4.7) 17(0,4.7) 18(-3,4.7) 19(-6,4.7) 20(-9,4.7) 21(-12,4.7) 22(-15,4.7)
  rect 3.43x1.65 smd: MP1(-18.895,0) MP2(18.895,0)
Top Overlay:
  circle w0.4: c16.4,-4.795 r0.2
  lines w0.2: -18.5,-1.155 -18.5,-3.755 -15.95,-3.755 ; -18.5,1.155 -18.5,3.755 -15.95,3.755 ; 15.95,-3.755 18.5,-3.755 18.5,-1.155 ; 15.95,3.755 18.5,3.755 18.5,1.155
Top Designator:
  text ".Designator" at -7.498,-0.5 h1.5
Top Component Outline:
  lines w0.1: -18.35,-0.75 -20.6,-0.75 -20.6,0.75 -18.35,0.75 ; -15.32,-3.68 -15.32,-5.698 -14.68,-5.698 -14.68,-3.68 ; -15.32,3.68 -15.32,5.698 -14.68,5.698 -14.68,3.68 ; -12.32,-3.68 -12.32,-5.698 -11.68,-5.698 -11.68,-3.68 ; -12.32,3.68 -12.32,5.698 -11.68,5.698 -11.68,3.68 ; -9.32,-3.68 -9.32,-5.698 -8.68,-5.698 -8.68,-3.68 ; -9.32,3.68 -9.32,5.698 -8.68,5.698 -8.68,3.68 ; -6.32,-3.68 -6.32,-5.698 -5.68,-5.698 -5.68,-3.68 ; -6.32,3.68 -6.32,5.698 -5.68,5.698 -5.68,3.68 ; -3.32,-3.68 -3.32,-5.698 -2.68,-5.698 -2.68,-3.68 ; -3.32,3.68 -3.32,5.698 -2.68,5.698 -2.68,3.68 ; -0.7,3.68 -0.7,5.08 0.7,5.08 0.7,3.68 ; -0.32,-3.68 -0.32,-5.698 0.32,-5.698 0.32,-3.68 ; -0.32,3.68 -0.32,5.698 0.32,5.698 0.32,3.68 ; 2.68,-3.68 2.68,-5.698 3.32,-5.698 3.32,-3.68 ; 2.68,3.68 2.68,5.698 3.32,5.698 3.32,3.68 ; 5.68,-3.68 5.68,-5.698 6.32,-5.698 6.32,-3.68 ; 5.68,3.68 5.68,5.698 6.32,5.698 6.32,3.68 ; 8.68,-3.68 8.68,-5.698 9.32,-5.698 9.32,-3.68 ; 8.68,3.68 8.68,5.698 9.32,5.698 9.32,3.68 ; 11.68,-3.68 11.68,-5.698 12.32,-5.698 12.32,-3.68 ; 11.68,3.68 11.68,5.698 12.32,5.698 12.32,3.68 ; 14.68,-3.68 14.68,-5.698 15.32,-5.698 15.32,-3.68 ; 14.68,3.68 14.68,5.698 15.32,5.698 15.32,3.68 ; 18.35,-0.75 20.6,-0.75 20.6,0.75 18.35,0.75 ; -18.35,-3.68 18.35,-3.68 18.35,3.68 -18.35,3.68 -18.35,-3.68
Top 3D Body:
  lines w0.1: -18.35,-0.75 -20.6,-0.75 -20.6,0.75 -18.35,0.75 ; -15.32,-3.68 -15.32,-5.698 -14.68,-5.698 -14.68,-3.68 ; -15.32,3.68 -15.32,5.698 -14.68,5.698 -14.68,3.68 ; -12.32,-3.68 -12.32,-5.698 -11.68,-5.698 -11.68,-3.68 ; -12.32,3.68 -12.32,5.698 -11.68,5.698 -11.68,3.68 ; -9.32,-3.68 -9.32,-5.698 -8.68,-5.698 -8.68,-3.68 ; -9.32,3.68 -9.32,5.698 -8.68,5.698 -8.68,3.68 ; -6.32,-3.68 -6.32,-5.698 -5.68,-5.698 -5.68,-3.68 ; -6.32,3.68 -6.32,5.698 -5.68,5.698 -5.68,3.68 ; -3.32,-3.68 -3.32,-5.698 -2.68,-5.698 -2.68,-3.68 ; -3.32,3.68 -3.32,5.698 -2.68,5.698 -2.68,3.68 ; -0.7,3.68 -0.7,5.08 0.7,5.08 0.7,3.68 ; -0.32,-3.68 -0.32,-5.698 0.32,-5.698 0.32,-3.68 ; -0.32,3.68 -0.32,5.698 0.32,5.698 0.32,3.68 ; 2.68,-3.68 2.68,-5.698 3.32,-5.698 3.32,-3.68 ; 2.68,3.68 2.68,5.698 3.32,5.698 3.32,3.68 ; 5.68,-3.68 5.68,-5.698 6.32,-5.698 6.32,-3.68 ; 5.68,3.68 5.68,5.698 6.32,5.698 6.32,3.68 ; 8.68,-3.68 8.68,-5.698 9.32,-5.698 9.32,-3.68 ; 8.68,3.68 8.68,5.698 9.32,5.698 9.32,3.68 ; 11.68,-3.68 11.68,-5.698 12.32,-5.698 12.32,-3.68 ; 11.68,3.68 11.68,5.698 12.32,5.698 12.32,3.68 ; 14.68,-3.68 14.68,-5.698 15.32,-5.698 15.32,-3.68 ; 14.68,3.68 14.68,5.698 15.32,5.698 15.32,3.68 ; 18.35,-0.75 20.6,-0.75 20.6,0.75 18.35,0.75 ; -18.35,-3.68 18.35,-3.68 18.35,3.68 -18.35,3.68 -18.35,-3.68
Top Courtyard:
  lines w0.05: -20.81,-6.17 -20.81,6.17 20.81,6.17 20.81,-6.17 -20.81,-6.17
Top Component Center:
  lines w0.05: -0.5,0 0.5,0 ; 0,-0.5 0,0.5
3D body "662322231822.stp": height 11.43, standoff 0.03, extent -20.6,-5.698 20.6,5.698

## 662324231822 [mm] "3.00mm SMT Male Dual Row Vertical Header with SMT Solder Tab, 24p"
height 9.9
pads (26):
  rect 1.27x2.54 smd: 1(16.5,-4.7) 2(13.5,-4.7) 3(10.5,-4.7) 4(7.5,-4.7) 5(4.5,-4.7) 6(1.5,-4.7) 7(-1.5,-4.7) 8(-4.5,-4.7) 9(-7.5,-4.7) 10(-10.5,-4.7) 11(-13.5,-4.7) 12(-16.5,-4.7) 13(16.5,4.7) 14(13.5,4.7) 15(10.5,4.7) 16(7.5,4.7) 17(4.5,4.7) 18(1.5,4.7) 19(-1.5,4.7) 20(-4.5,4.7) 21(-7.5,4.7) 22(-10.5,4.7) 23(-13.5,4.7) 24(-16.5,4.7)
  rect 3.43x1.65 smd: MP1(-20.395,0) MP2(20.395,0)
Top Overlay:
  circle w0.4: c17.9,-4.795 r0.2
  lines w0.2: -20,-1.155 -20,-3.755 -17.45,-3.755 ; -20,1.155 -20,3.755 -17.45,3.755 ; 17.45,-3.755 20,-3.755 20,-1.155 ; 17.45,3.755 20,3.755 20,1.155
Top Designator:
  text ".Designator" at -7.498,-0.5 h1.5
Top Component Outline:
  lines w0.1: -19.85,-0.75 -22.1,-0.75 -22.1,0.75 -19.85,0.75 ; -16.82,-3.68 -16.82,-5.698 -16.18,-5.698 -16.18,-3.68 ; -16.82,3.68 -16.82,5.698 -16.18,5.698 -16.18,3.68 ; -13.82,-3.68 -13.82,-5.698 -13.18,-5.698 -13.18,-3.68 ; -13.82,3.68 -13.82,5.698 -13.18,5.698 -13.18,3.68 ; -10.82,-3.68 -10.82,-5.698 -10.18,-5.698 -10.18,-3.68 ; -10.82,3.68 -10.82,5.698 -10.18,5.698 -10.18,3.68 ; -7.82,-3.68 -7.82,-5.698 -7.18,-5.698 -7.18,-3.68 ; -7.82,3.68 -7.82,5.698 -7.18,5.698 -7.18,3.68 ; -4.82,-3.68 -4.82,-5.698 -4.18,-5.698 -4.18,-3.68 ; -4.82,3.68 -4.82,5.698 -4.18,5.698 -4.18,3.68 ; -1.82,-3.68 -1.82,-5.698 -1.18,-5.698 -1.18,-3.68 ; -1.82,3.68 -1.82,5.698 -1.18,5.698 -1.18,3.68 ; -0.7,3.68 -0.7,5.08 0.7,5.08 0.7,3.68 ; 1.18,-3.68 1.18,-5.698 1.82,-5.698 1.82,-3.68 ; 1.18,3.68 1.18,5.698 1.82,5.698 1.82,3.68 ; 4.18,-3.68 4.18,-5.698 4.82,-5.698 4.82,-3.68 ; 4.18,3.68 4.18,5.698 4.82,5.698 4.82,3.68 ; 7.18,-3.68 7.18,-5.698 7.82,-5.698 7.82,-3.68 ; 7.18,3.68 7.18,5.698 7.82,5.698 7.82,3.68 ; 10.18,-3.68 10.18,-5.698 10.82,-5.698 10.82,-3.68 ; 10.18,3.68 10.18,5.698 10.82,5.698 10.82,3.68 ; 13.18,-3.68 13.18,-5.698 13.82,-5.698 13.82,-3.68 ; 13.18,3.68 13.18,5.698 13.82,5.698 13.82,3.68 ; 16.18,-3.68 16.18,-5.698 16.82,-5.698 16.82,-3.68 ; 16.18,3.68 16.18,5.698 16.82,5.698 16.82,3.68 ; 19.85,-0.75 22.1,-0.75 22.1,0.75 19.85,0.75 ; -19.85,-3.68 19.85,-3.68 19.85,3.68 -19.85,3.68 -19.85,-3.68
Top 3D Body:
  lines w0.1: -19.85,-0.75 -22.1,-0.75 -22.1,0.75 -19.85,0.75 ; -16.82,-3.68 -16.82,-5.698 -16.18,-5.698 -16.18,-3.68 ; -16.82,3.68 -16.82,5.698 -16.18,5.698 -16.18,3.68 ; -13.82,-3.68 -13.82,-5.698 -13.18,-5.698 -13.18,-3.68 ; -13.82,3.68 -13.82,5.698 -13.18,5.698 -13.18,3.68 ; -10.82,-3.68 -10.82,-5.698 -10.18,-5.698 -10.18,-3.68 ; -10.82,3.68 -10.82,5.698 -10.18,5.698 -10.18,3.68 ; -7.82,-3.68 -7.82,-5.698 -7.18,-5.698 -7.18,-3.68 ; -7.82,3.68 -7.82,5.698 -7.18,5.698 -7.18,3.68 ; -4.82,-3.68 -4.82,-5.698 -4.18,-5.698 -4.18,-3.68 ; -4.82,3.68 -4.82,5.698 -4.18,5.698 -4.18,3.68 ; -1.82,-3.68 -1.82,-5.698 -1.18,-5.698 -1.18,-3.68 ; -1.82,3.68 -1.82,5.698 -1.18,5.698 -1.18,3.68 ; -0.7,3.68 -0.7,5.08 0.7,5.08 0.7,3.68 ; 1.18,-3.68 1.18,-5.698 1.82,-5.698 1.82,-3.68 ; 1.18,3.68 1.18,5.698 1.82,5.698 1.82,3.68 ; 4.18,-3.68 4.18,-5.698 4.82,-5.698 4.82,-3.68 ; 4.18,3.68 4.18,5.698 4.82,5.698 4.82,3.68 ; 7.18,-3.68 7.18,-5.698 7.82,-5.698 7.82,-3.68 ; 7.18,3.68 7.18,5.698 7.82,5.698 7.82,3.68 ; 10.18,-3.68 10.18,-5.698 10.82,-5.698 10.82,-3.68 ; 10.18,3.68 10.18,5.698 10.82,5.698 10.82,3.68 ; 13.18,-3.68 13.18,-5.698 13.82,-5.698 13.82,-3.68 ; 13.18,3.68 13.18,5.698 13.82,5.698 13.82,3.68 ; 16.18,-3.68 16.18,-5.698 16.82,-5.698 16.82,-3.68 ; 16.18,3.68 16.18,5.698 16.82,5.698 16.82,3.68 ; 19.85,-0.75 22.1,-0.75 22.1,0.75 19.85,0.75 ; -19.85,-3.68 19.85,-3.68 19.85,3.68 -19.85,3.68 -19.85,-3.68
Top Courtyard:
  lines w0.05: -22.31,-6.17 -22.31,6.17 22.31,6.17 22.31,-6.17 -22.31,-6.17
Top Component Center:
  lines w0.05: -0.5,0 0.5,0 ; 0,-0.5 0,0.5
3D body "662324231822.stp": height 11.43, standoff 0.03, extent -22.1,-5.698 22.1,5.698